# Altium schematic symbol library ADS8688IDBTR.SchLib: 1 symbol
Pins are listed as number, name and electrical type; pins without a type are passive.

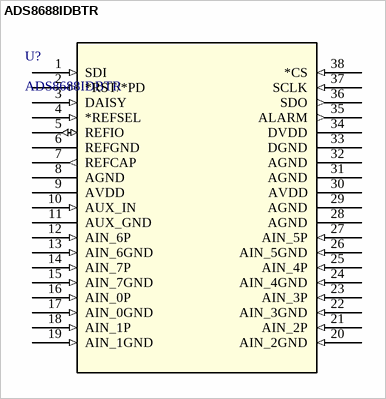
[diagram p0: symbol ADS8688IDBTR]

## ADS8688IDBTR
designator U?
16-bit, 500kSPS 8-channel single-supply SAR ADC with bipolar input ranges 38-TSSOP -40 to 125; Manufacturer_Name: Texas Instruments; Copyright: Copyright (C) 2026 Ultra Librarian. All rights reserved.; Manufacturer_Part_Number: ADS8688IDBTR; RefDes: RefDes; Type: Type
footprint DBT38_TEX
pins: 1 SDI (in), 2 *RST/*PD (in), 3 DAISY (in), 4 *REFSEL (in), 5 REFIO (io), 6 REFGND (power), 7 REFCAP (out), 8 AGND (power), 9 AVDD (power), 10 AUX_IN (in), 11 AUX_GND (power), 12 AIN_6P (in), 13 AIN_6GND (in), 14 AIN_7P (in), 15 AIN_7GND (in), 16 AIN_0P (in), 17 AIN_0GND (in), 18 AIN_1P (in), 19 AIN_1GND (in), 20 AIN_2GND (in), 21 AIN_2P (in), 22 AIN_3GND (in), 23 AIN_3P (in), 24 AIN_4GND (in), 25 AIN_4P (in), 26 AIN_5GND (in), 27 AIN_5P (in), 28 AGND (power), 29 AGND (power), 30 AVDD (power), 31 AGND (power), 32 AGND (power), 33 DGND (power), 34 DVDD (power), 35 ALARM (out), 36 SDO (out), 37 SCLK (in), 38 *CS (in)